# Altium footprint library Master.PcbLib: 178 footprints (part 7 of 12)
Each footprint in its own frame and in the unit in brackets; x right, y up, seen from the top. Pads: shape width x height; smd on the part's side, far side on the other; paste and mask are expansions set on the pad; w line width, h text height; cw(c..) or ccw(c..) is an arc to the next point about the centre after c.
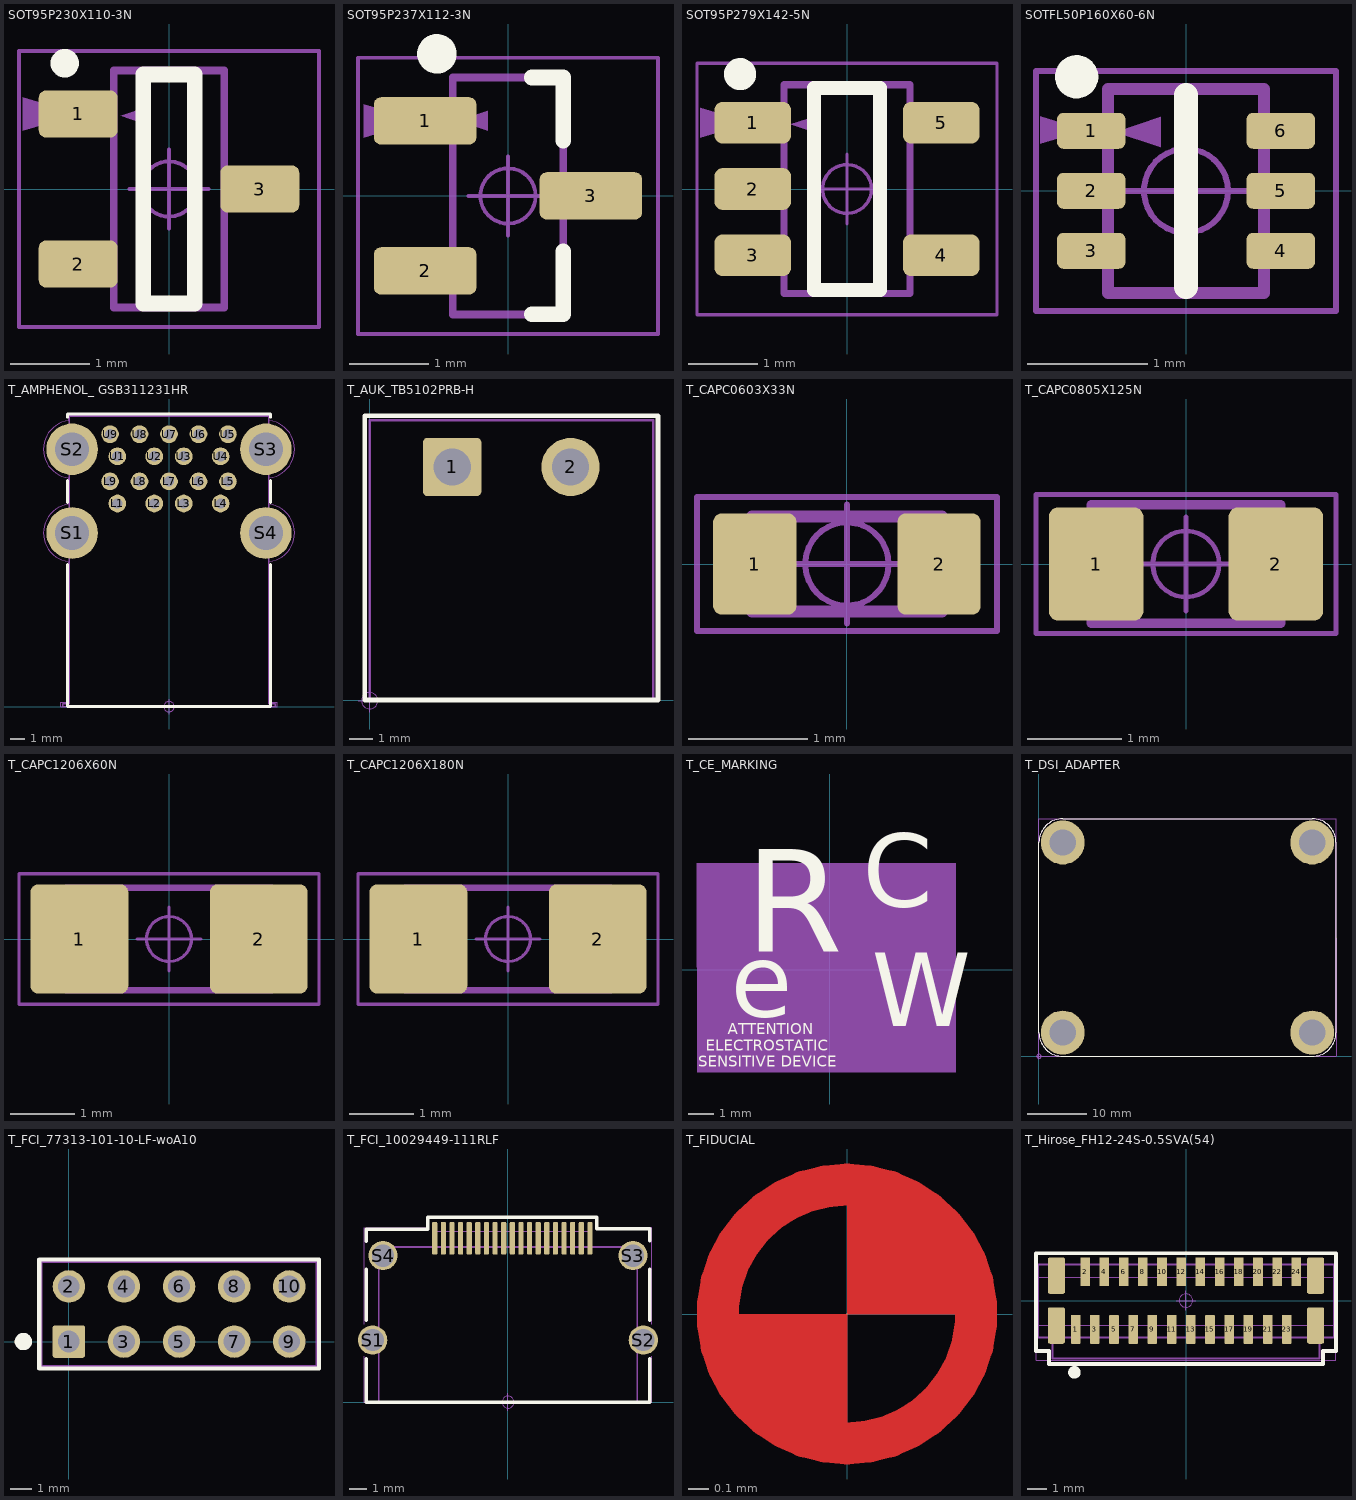
[diagram p6: the footprints below, top view; thin cyan lines are the x and y axes]

## SOT95P230X110-3N [mm]
pads (3):
  rrect30% 1x0.6 smd: 1(-1.15,0.95) 2(-1.15,-0.95) 3(1.15,0)
Top Overlay:
  circle w0.2: c-1.321,1.593 r0.08
  lines w0.2: -0.325,-1.45 -0.325,1.45 0.325,1.45 0.325,-1.45 -0.325,-1.45
Top Component Outline:
  region: -1.85,0.737 -1.14,0.95 -1.85,1.163
  lines w0.05: -1.9,-1.75 -1.9,1.75 1.9,1.75 1.9,-1.75 -1.9,-1.75
Top 3D Body:
  lines w0.001: -0.7,-1.5 -0.7,1.5 0.7,1.5 0.7,-1.5 -0.7,-1.5
Top Component Center:
  circle w0.05: c0,0 r0.35
  lines w0.05: -0.5,0 0.5,0 ; 0,-0.5 0,0.5
Top Dimensions:
  region: -0.61,0.925 -0.229,1.052 -0.229,0.798
  lines w0.1: -0.7,-1.5 -0.7,1.5 0.7,1.5 0.7,-1.5 -0.7,-1.5
Top Assembly:
  text ".Designator" at -1.8,2 h0.75
3D body "User Library-SOT-23-2.STEP": height 1.08, standoff 0, extent -1.32,-1.5 1.32,1.5

## SOT95P237X112-3N [mm]
pads (3):
  rrect30% 1.3x0.6 smd: 1(-1.05,0.95) 2(-1.05,-0.95) 3(1.05,0)
Top Overlay:
  circle w0.25: c-0.9,1.8 r0.125
  lines w0.2: 0.3,-1.5 0.7,-1.5 0.7,-0.7 ; 0.3,1.5 0.7,1.5 0.7,0.7
Top Component Outline:
  region: -1.825,0.737 -1.115,0.95 -1.825,1.163
  lines w0.05: -1.9,-1.75 -1.9,1.75 1.9,1.75 1.9,-1.75 -1.9,-1.75
Top 3D Body:
  lines w0.001: -0.7,-1.5 0.7,-1.5 0.7,1.5 -0.7,1.5 -0.7,-1.5
Top Component Center:
  circle w0.05: c0,0 r0.35
  lines w0.05: -0.5,0 0.5,0 ; 0,-0.5 0,0.5
Top Dimensions:
  region: -0.635,0.95 -0.254,1.077 -0.254,0.823
  lines w0.1: -0.7,-1.5 -0.7,1.5 0.7,1.5 0.7,-1.5 -0.7,-1.5
Top Assembly:
  text ".Designator" at -1.6,2.1 h0.75
3D body "CircuitWorks-SOT-23.step": height 1.09, standoff 0, extent -1.25,-1.5 1.25,1.5

## SOT95P279X142-5N [mm]
pads (5):
  rrect40% 1.1x0.6 smd: 1(-1.35,0.95) 2(-1.35,0) 3(-1.35,-0.95) 4(1.35,-0.95) 5(1.35,0.95)
Top Overlay:
  circle w0.3: c-1.533,1.646 r0.08
  lines w0.2: -0.475,-1.45 -0.475,1.45 0.475,1.45 0.475,-1.45 -0.475,-1.45
Top Component Outline:
  region: -2.1,0.737 -1.39,0.95 -2.1,1.163
  lines w0.05: -2.15,-1.8 -2.15,1.8 2.15,1.8 2.15,-1.8 -2.15,-1.8
Top 3D Body:
  lines w0.001: -0.9,-1.45 -0.9,1.45 0.9,1.45 0.9,-1.45 -0.9,-1.45
Top Component Center:
  circle w0.05: c0,0 r0.35
  lines w0.05: -0.5,0 0.5,0 ; 0,-0.5 0,0.5
Top Dimensions:
  region: -0.81,0.925 -0.429,1.052 -0.429,0.798
  lines w0.1: -0.9,-1.5 -0.9,1.5 0.9,1.5 0.9,-1.5 -0.9,-1.5
Top Assembly:
  text ".Designator" at -1.7,2.25 h0.75
3D body "User Library-SOT23-5-2.step": height 1.45, standoff 0, extent -1.4,-1.45 1.4,1.45

## SOTFL50P160X60-6N [mm]
pads (6):
  rrect35% 0.57x0.3 smd: 1(-0.79,0.5) 2(-0.79,0) 3(-0.79,-0.5) 4(0.79,-0.5) 5(0.79,0) 6(0.79,0.5)
Top Overlay:
  circle w0.2: c-0.911,0.95 r0.08
  lines w0.2: 0,-0.8 0,0.8
Top Component Outline:
  region: -1.214,0.393 -0.836,0.507 -1.214,0.62
  lines w0.05: -1.25,-1 1.25,-1 1.25,1 -1.25,1 -1.25,-1
Top 3D Body:
  lines w0.001: -0.65,-0.85 0.65,-0.85 0.65,0.85 -0.65,0.85 -0.65,-0.85
Top Component Center:
  circle w0.05: c0,0 r0.35
  lines w0.05: -0.5,0 0.5,0 ; 0,-0.5 0,0.5
Top Dimensions:
  region: -0.59,0.489 -0.209,0.616 -0.209,0.362
  lines w0.1: -0.65,-0.85 0.65,-0.85 0.65,0.85 -0.65,0.85 -0.65,-0.85
Top Assembly:
  text ".Designator" at -1.4,1.35 h0.75
3D body "User Library-SOT-563.STEP": height 0.58, standoff 0, extent -0.813,-0.8 0.813,0.8

## T_AMPHENOL_ GSB311231HR [mm]
pads (22):
  round 1.2 hole 0.7: L1(-3.5,13.78) L2(-1,13.78) L3(1,13.78) L4(3.5,13.78) L5(4,15.28) L6(2,15.28) L7(0,15.28) L8(-2,15.28) L9(-4,15.28) U1(-3.5,16.98) U2(-1,16.98) U3(1,16.98) U4(3.5,16.98) U5(4,18.48) U6(2,18.48) U7(0,18.48) U8(-2,18.48) U9(-4,18.48)
  round 3.5 hole 2.3: S1(-6.57,11.78) S2(-6.57,17.46) S3(6.57,17.46) S4(6.57,11.78)
Top Overlay:
  lines w0.2: -6.9,9.65 -6.9,0 6.9,0 6.9,9.65 ; -6.9,13.85 -6.9,15.35 ; -6.9,19.63 -6.9,19.85 6.9,19.85 6.9,19.63 ; 6.9,13.85 6.9,15.35
Top Component Outline:
  lines w0.05: -6.809,9.837 -6.809,0.3 -7.349,0.3 -7.349,0 7.349,0 7.349,0.3 6.81,0.3 6.809,9.838 ; -6.809,13.725 -6.809,15.515 ; -6.809,9.837 cw(c-6.565,11.779) -6.809,13.722 ; -6.809,15.517 cw(c-6.565,17.459) -6.809,19.402 -6.809,19.76 6.809,19.76 6.809,19.403 ; 6.809,9.838 ccw(c6.565,11.781) 6.809,13.723 ; 6.809,15.518 ccw(c6.565,17.461) 6.809,19.403 ; 6.809,13.725 6.809,15.515
Top 3D Body:
  lines w0.01: -6.753,19.7 6.747,19.7 ; -6.75,19.7 -6.75,0.2 -7.2,0.2 -7.2,0 7.2,0 7.2,0.2 ; 6.75,19.7 6.75,0.2 7.2,0.2
Top Component Center:
  circle w0.05: c0,0 r0.35
  lines w0.05: -0.5,0 0.5,0 ; 0,-0.5 0,0.5
Top Dimensions:
  lines w0.1: -7.2,0 7.2,0 7.2,0.2 6.75,0.2 6.75,19.7 -6.75,19.7 -6.75,0.2 -7.2,0.2 -7.2,0
Top Assembly:
  text ".Designator" at -1.725,20.175 h0.75
3D body "GSB311231HR.STEP": height 16.13, standoff -3.49, extent -7.795,0 7.795,19.7

## T_AUK_TB5102PRB-H [mm]
pads (2):
  rrect15% 2.5x2.5 hole 1.6: 1(3.54,10)
  round 2.5 hole 1.6: 2(8.62,10)
Top Overlay:
  lines w0.2: -0.21,0 12.37,0 12.37,12.2 -0.21,12.2 -0.21,0
Top Component Outline:
  lines w0.05: 0,0 12.16,0 12.16,12 0,12 0,0
Top 3D Body:
  lines w0.001: 0,0 12.16,0 12.16,12 0,12 0,0
Top Component Center:
  circle w0.05: c0,-0.025 r0.35
  lines w0.05: -0.5,-0.025 0.5,-0.025 ; 0,-0.525 0,0.475
Top Dimensions:
  lines w0.1: 0,0 12.16,0 12.16,12 0,12 0,0
Top Assembly:
  text ".Designator" at 4.05,12.775 h0.75
3D body "c-796638-2-c3-3d.stp": height 8.37, standoff -3.48, extent -0.16,0 11.82,12

## T_CAPC0603X33N [mm]
pads (2):
  rrect20% 0.7x0.85 smd: 1(-0.775,0) 2(0.775,0)
Top Component Outline:
  lines w0.05: -1.261,-0.563 1.262,-0.563 1.262,0.563 -1.261,0.563 -1.261,-0.563
Top 3D Body:
  lines w0.001: -0.8,-0.4 0.8,-0.4 0.8,0.4 -0.8,0.4 -0.8,-0.4
Top Component Center:
  circle w0.05: c0,0 r0.35
  lines w0.05: -0.5,0 0.5,0 ; 0,-0.5 0,0.5
Top Dimensions:
  lines w0.1: -0.8,-0.4 0.8,-0.4 0.8,0.4 -0.8,0.4 -0.8,-0.4
Top Assembly:
  text ".Designator" at -1.3,0.8 h0.75
3D body "User Library-CAPC1608X09.step": height 0.9, standoff 0, extent -0.8,-0.4 0.8,0.4

## T_CAPC0805X125N [mm]
pads (2):
  rrect20% 1x1.2 smd: 1(-0.95,0) 2(0.95,0)
Top Component Outline:
  lines w0.05: -1.586,-0.736 1.586,-0.736 1.586,0.736 -1.586,0.736 -1.586,-0.736
Top 3D Body:
  lines w0.001: -1,-0.625 -1,0.625 1,0.625 1,-0.625 -1,-0.625
Top Component Center:
  circle w0.05: c0,0 r0.35
  lines w0.05: -0.5,0 0.5,0 ; 0,-0.5 0,0.5
Top Dimensions:
  lines w0.1: -1,-0.625 1,-0.625 1,0.625 -1,0.625 -1,-0.625
Top Assembly:
  text ".Designator" at -1.225,0.95 h0.75
3D body "User Library-CAPC2013X10.STEP": height 1, standoff 0, extent -1,-0.625 1,0.625

## T_CAPC1206X60N [mm]
pads (2):
  rrect15% 1.524x1.7 smd: 1(-1.397,0) 2(1.397,0)
Top Component Outline:
  lines w0.05: -2.337,-1.016 -2.337,1.016 2.336,1.016 2.336,-1.016 -2.337,-1.016
Top Component Center:
  circle w0.05: c0,0 r0.35
  lines w0.05: -0.5,0 0.5,0 ; 0,-0.5 0,0.5
Top Dimensions:
  lines w0.1: -1.6,-0.8 -1.6,0.8 1.6,0.8 1.6,-0.8 -1.6,-0.8
Top Assembly:
  text ".Designator" at -1.475,1.325 h0.75
3D body "c1206c225k5ractu.stp": height 1.8, standoff 0, extent -1.7,-0.9 1.7,0.9

## T_CAPC1206X180N [mm]
pads (2):
  rrect15% 1.524x1.7 smd: 1(-1.397,0) 2(1.397,0)
Top Component Outline:
  lines w0.05: -2.337,-1.016 -2.337,1.016 2.336,1.016 2.336,-1.016 -2.337,-1.016
Top 3D Body:
  lines w0.01: -1.6,-0.8 1.6,-0.8 1.6,0.8 -1.6,0.8 -1.6,-0.8
Top Component Center:
  circle w0.05: c0,0 r0.35
  lines w0.05: -0.5,0 0.5,0 ; 0,-0.5 0,0.5
Top Dimensions:
  lines w0.1: -1.6,-0.8 -1.6,0.8 1.6,0.8 1.6,-0.8 -1.6,-0.8
Top Assembly:
  text ".Designator" at -1.475,1.325 h0.75
3D body "capacitor 1206.step": height 1, standoff 0, extent -1.6,-0.8 1.6,0.8

## T_CE_MARKING [mm] "Silkscreen CE Marking"
Top Overlay:
  text "R" at -3.353,-0.61 h7
  text "C" at 1.329,1.549 h5
  text "e" at -3.941,-2.819 h5
  text "W" at 1.676,-3.2 h5
  text "SENSITIVE DEVICE" at -5.232,-4.013 h0.75
  text "ELECTROSTATIC" at -4.939,-3.378 h0.75
  text "ATTENTION" at -4.06,-2.718 h0.75
Top 3D Body:
  region: -5.283,4.242 5.029,4.242 5.029,-4.089 -5.283,-4.089

## T_DSI_ADAPTER [mm]
pads (4):
  round 7.4 / inner round 5.3 / far side round 0 hole 4.4 unplated: ""(4,4) ""(4,36) ""(46,4) ""(46,36)
Top Overlay:
  lines w0.2: 0,4 ccw(c4,4) 4,0 46,0 ccw(c46,4) 50,4 50,36 ccw(c46,36) 46,40 4,40 ccw(c4,36) 0,36 0,4
Top Paste:
  drawing of 16 lines, arcs and shapes, not listed
Top 3D Body:
  lines w0.01: 0,0 50,0 50,40 0,40 0,0
Top Component Center:
  circle w0.05: c46,4 r0.35
  circle w0.05: c46,36 r0.35
  circle w0.05: c4,36 r0.35
  circle w0.05: c4,4 r0.35
  circle w0.05: c0,0 r0.35
  lines w0.05: -0.5,0 0.5,0 ; 0,-0.5 0,0.5 ; 3.5,4 4.5,4 ; 3.5,36 4.5,36 ; 4,3.5 4,4.5 ; 4,35.5 4,36.5 ; 45.5,4 46.5,4 ; 45.5,36 46.5,36 ; 46,3.5 46,4.5 ; 46,35.5 46,36.5
Top Dimensions:
  lines w0.1: 0,4 ccw(c4,4) 4,0 46,0 ccw(c46,4) 50,4 50,36 ccw(c46,36) 46,40 4,40 ccw(c4,36) 0,36 0,4
3D body "9774080360R (rev1).stp": height 8.01, standoff -1.39, extent 1,33 7,39
3D body "9774080360R (rev1).stp": height 8.01, standoff -1.39, extent 43,33 49,39
3D body "9774080360R (rev1).stp": height 8.01, standoff -1.39, extent 43,1 49,7
3D body "9774080360R (rev1).stp": height 8.01, standoff -1.39, extent 1,1 7,7

## T_FCI_77313-101-10-LF-woA10 [mm] "2.54 mm header"
height 10.8
pads (10):
  rrect15% 1.5x1.5 hole 1: 1(0,0)
  round 1.5 hole 1: 2(0,2.54) 3(2.54,0) 4(2.54,2.54) 5(5.08,0) 6(5.08,2.54) 7(7.62,0) 8(7.62,2.54) 9(10.16,0) 10(10.16,2.54)
Top Overlay:
  circle w0.4: c-2.1,0 r0.2
  lines w0.2: -1.372,-1.245 -1.372,3.785 11.532,3.785 11.532,-1.245 -1.372,-1.245
Top Component Outline:
  lines w0.05: -1.372,-1.245 -1.372,3.785 11.532,3.785 11.532,-1.245 -1.372,-1.245
Top 3D Body:
  lines w0.001: -1.27,-1.14 -1.27,3.68 11.43,3.68 11.43,-1.14 -1.27,-1.14
Top Component Center:
  circle w0.05: c0,0 r0.35
  lines w0.05: -0.5,0 0.5,0 ; 0,-0.5 0,0.5
Top Dimensions:
  lines w0.1: -1.27,-1.14 11.43,-1.14 ; -1.27,-1.137 -1.27,3.68 11.43,3.68 11.43,-1.137
Top Assembly:
  text ".Designator" at 3.6,4 h0.75
3D body "77313-101-10lf.stp": height 8.39, standoff -2.41, extent -1.07,-1.145 11.23,3.685

## T_FCI_10029449-111RLF [mm]
pads (23):
  rrect50% 0.3x1.9 smd: 1(4.75,9.5) 2(4.25,9.5) 3(3.75,9.5) 4(3.25,9.5) 5(2.75,9.5) 6(2.25,9.5) 7(1.75,9.5) 8(1.25,9.5) 9(0.75,9.5) 10(0.25,9.5) 11(-0.25,9.5) 12(-0.75,9.5) 13(-1.25,9.5) 14(-1.75,9.5) 15(-2.25,9.5) 16(-2.75,9.5) 17(-3.25,9.5) 18(-3.75,9.5) 19(-4.25,9.5)
  round 1.7 hole 1.3: S1(-7.85,3.6) S2(7.85,3.6) S3(7.25,8.5) S4(-7.25,8.5)
Top Overlay:
  lines w0.2: -8.225,2.525 -8.225,0 8.225,0 8.225,2.525 ; -8.225,4.745 -8.225,7.7 ; -8.225,9.315 -8.225,10.025 -4.65,10.025 -4.65,10.72 5.15,10.72 5.15,10.055 8.225,10.055 8.225,9.345 ; 8.225,4.745 8.225,7.7
Top Paste:
  circle w1: c-7.85,3.6 r0.351
  circle w1: c7.85,3.6 r0.351
  circle w1: c7.25,8.5 r0.351
  circle w1: c-7.25,8.5 r0.351
Top Component Outline:
  lines w0.05: -8.325,2.66 -8.325,0 8.325,0 8.325,2.66 ; -8.325,4.525 -8.325,10.125 -4.65,10.125 -4.65,10.695 5.15,10.695 5.15,10.15 8.325,10.15 8.325,4.525
Top 3D Body:
  lines w0.01: -7.5,0 7.5,0 ; -7.5,0 -7.5,9 ; -7.5,0 7.5,0 ; -7.5,0 -7.5,9 ; -7.5,9 7.5,9 ; -7.5,9 7.5,9 ; -4.35,9.9 -4.35,9 -4.35,9.9 ; -4.35,9.9 4.85,9.9 ; -4.35,9.9 4.85,9.9 ; 4.85,9.9 4.85,9 4.85,9.9 ; 7.5,0 7.5,9 ; 7.5,0 7.5,9
Top Component Center:
  circle w0.05: c0,0 r0.35
  lines w0.05: -0.5,0 0.5,0 ; 0,-0.5 0,0.5
Top Dimensions:
  lines w0.1: -7.5,0 7.5,0 7.5,9 -7.5,9 -7.5,0
Top Assembly:
  text ".Designator" at -1.875,11.15 h0.75
3D body "10029449-111RLF.STEP": height 6.17, standoff -1.83, extent -8.1,0 8.1,9.85

## T_FIDUCIAL [mm]
pads (1):
  round 0.001 smd: ""(0,0)
Top Layer:
  region: 0,0 0,0.6 0.119,0.6 0.34,0.509 0.509,0.34 0.6,0.119 0.6,0
  region: 0,0 0,-0.6 -0.119,-0.6 -0.34,-0.509 -0.509,-0.34 -0.6,-0.119 -0.6,0
  lines w0.203: 0,-0.625 cw(c0,0) 0,0.625 cw(c0,0) 0,-0.625
Top Solder:
  circle w0.203: c0,0 r0.625
  region: -0.725,0 -0.725,0.071 -0.697,0.211 -0.642,0.343 -0.563,0.462 -0.462,0.563 -0.343,0.642 -0.211,0.697 -0.071,0.725 0,0.725 0.071,0.725 0.211,0.697 0.343,0.642 0.462,0.563 0.563,0.462 0.642,0.343 0.697,0.211 0.725,0.071 0.725,0 0.725,-0.071 0.697,-0.211 0.642,-0.343 0.563,-0.462 0.462,-0.563 0.343,-0.642 0.211,-0.697 0.071,-0.725 0,-0.725 -0.071,-0.725 -0.211,-0.697 -0.343,-0.642 -0.462,-0.563 -0.563,-0.462 -0.642,-0.343 -0.697,-0.211 -0.725,-0.071

## T_Hirose_FH12-24S-0.5SVA(54) [mm] "FFC Connector 0.5mm pitch Vertical"
height 5.5
pads (28):
  rrect12% 0.5x1.5 smd: 1(-5.75,-1.5) 2(-5.25,1.5) 3(-4.75,-1.5) 4(-4.25,1.5) 5(-3.75,-1.5) 6(-3.25,1.5) 7(-2.75,-1.5) 8(-2.25,1.5) 9(-1.75,-1.5) 10(-1.25,1.5) 11(-0.75,-1.5) 12(-0.25,1.5) 13(0.25,-1.5) 14(0.75,1.5) 15(1.25,-1.5) 16(1.75,1.5) 17(2.25,-1.5) 18(2.75,1.5) 19(3.25,-1.5) 20(3.75,1.5) 21(4.25,-1.5) 22(4.75,1.5) 23(5.25,-1.5) 24(5.75,1.5)
  rrect25% 0.9x1.9 smd: ""(-6.75,-1.3) ""(-6.75,1.3) ""(6.75,-1.3) ""(6.75,1.3)
Top Overlay:
  circle w0.4: c-5.81,-3.738 r0.125
  lines w0.2: -7.814,-2.625 -7.814,2.464 7.814,2.464 7.814,-2.625 7.132,-2.625 7.132,-3.307 -7.132,-3.307 -7.132,-2.625 -7.814,-2.625
Top Component Outline:
  lines w0.05: -7.8,-3.116 7.8,-3.116 7.8,2.416 -7.8,2.416 -7.8,-3.116
Top 3D Body:
  lines w0.001: -6.95,-1.925 -6.95,-3.025 6.95,-3.025 6.95,-1.925
  lines w0.01: -7.7,-1.275 7.7,-1.275 ; -7.7,1.225 7.7,1.225 ; -7.7,-1.925 7.7,-1.925 7.7,1.875 -7.7,1.875 -7.7,-1.925
Top Component Center:
  circle w0.05: c0,0 r0.35
  lines w0.05: -0.5,0 0.5,0 ; 0,-0.5 0,0.5
Top Dimensions:
  lines w0.1: -6.95,-1.925 -6.95,-3.025 6.95,-3.025 6.95,-1.925 ; -7.7,-1.925 7.7,-1.925 7.7,1.875 -7.7,1.875 -7.7,-1.925
Top Assembly:
  text ".Designator" at -1.48,-0.22 h0.75
3D body "FH12-24S-0.5SV.stp": height 5.52, standoff 0.02, extent -7.7,-1.925 7.7,1.875